# Altium schematic symbol library KLDHCX-0202-B.SchLib: 1 symbol
Pins are listed as number, name and electrical type; pins without a type are passive.

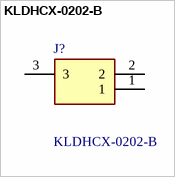
[diagram p0: symbol KLDHCX-0202-B]

## KLDHCX-0202-B
designator J?
DC Power Connectors 2.5MM DIA HIGH CURRENT; Manufacturer_Name: Kycon; Geometry.Height: 11mm; Manufacturer_Part_Number: KLDHCX-0202-B; Mouser Part Number: 806-KLDHCX-0202-B; Mouser Price/Stock: https://www.mouser.co.uk/ProductDetail/Kycon/KLDHCX-0202-B?qs=3kl6BaT4OLKD0IyWsYmUFw%3D%3D; Arrow Part Number: *; Arrow Price/Stock: *; Datasheet Link: http://anacapa.kycon.com/2013Catalogpage/DC%20Power/KLDHCX-0202.pdf
footprint KLDHCX0202B
pins: 1, 2, 3